# Altium schematic symbol library ics.SchLib: 1 symbol
Pins are listed as number, name and electrical type; pins without a type are passive.

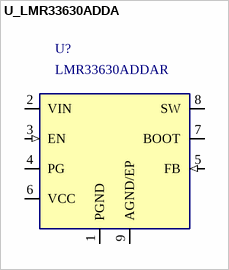
[diagram p0: symbol U_LMR33630ADDA]

## U_LMR33630ADDA
designator U?, comment LMR33630ADDAR
Sync buck 3.8-36 V in, 3 A, 400 kHz (A), HSOIC-8 PowerPAD; EP = AGND; Manufacturer: Texas Instruments; Value: LMR33630ADDAR; MPN: LMR33630ADDAR; LCSC: C841384; JLCPCB Type: Extended; Datasheet: lmr33630.pdf
footprint LMR33630_HSOIC8_DDA
pins: 1 PGND (power), 2 VIN (power), 3 EN (in), 4 PG (oc), 5 FB (in), 6 VCC, 7 BOOT, 8 SW, 9 AGND/EP (power)